# Altium integrated library RE0402FRE0710KL.IntLib: 1 symbol
Pins are listed as number, name and electrical type; pins without a type are passive.

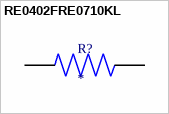
[diagram p0: symbol RE0402FRE0710KL]

## RE0402FRE0710KL
designator R?
RES SMD 10K OHM 1% 1/16W 0402; MP: RE0402FRE0710KL; Package: None; Price: None; Value: *; Availability: Unavailable
footprint RESC1005X37N
pins: 1, 2